# Altium footprint library TQFP.PcbLib: 17 footprints (part 1 of 2)
Each footprint in its own frame and in the unit in brackets; x right, y up, seen from the top. Pads: shape width x height; smd on the part's side, far side on the other; paste and mask are expansions set on the pad; w line width, h text height; cw(c..) or ccw(c..) is an arc to the next point about the centre after c.
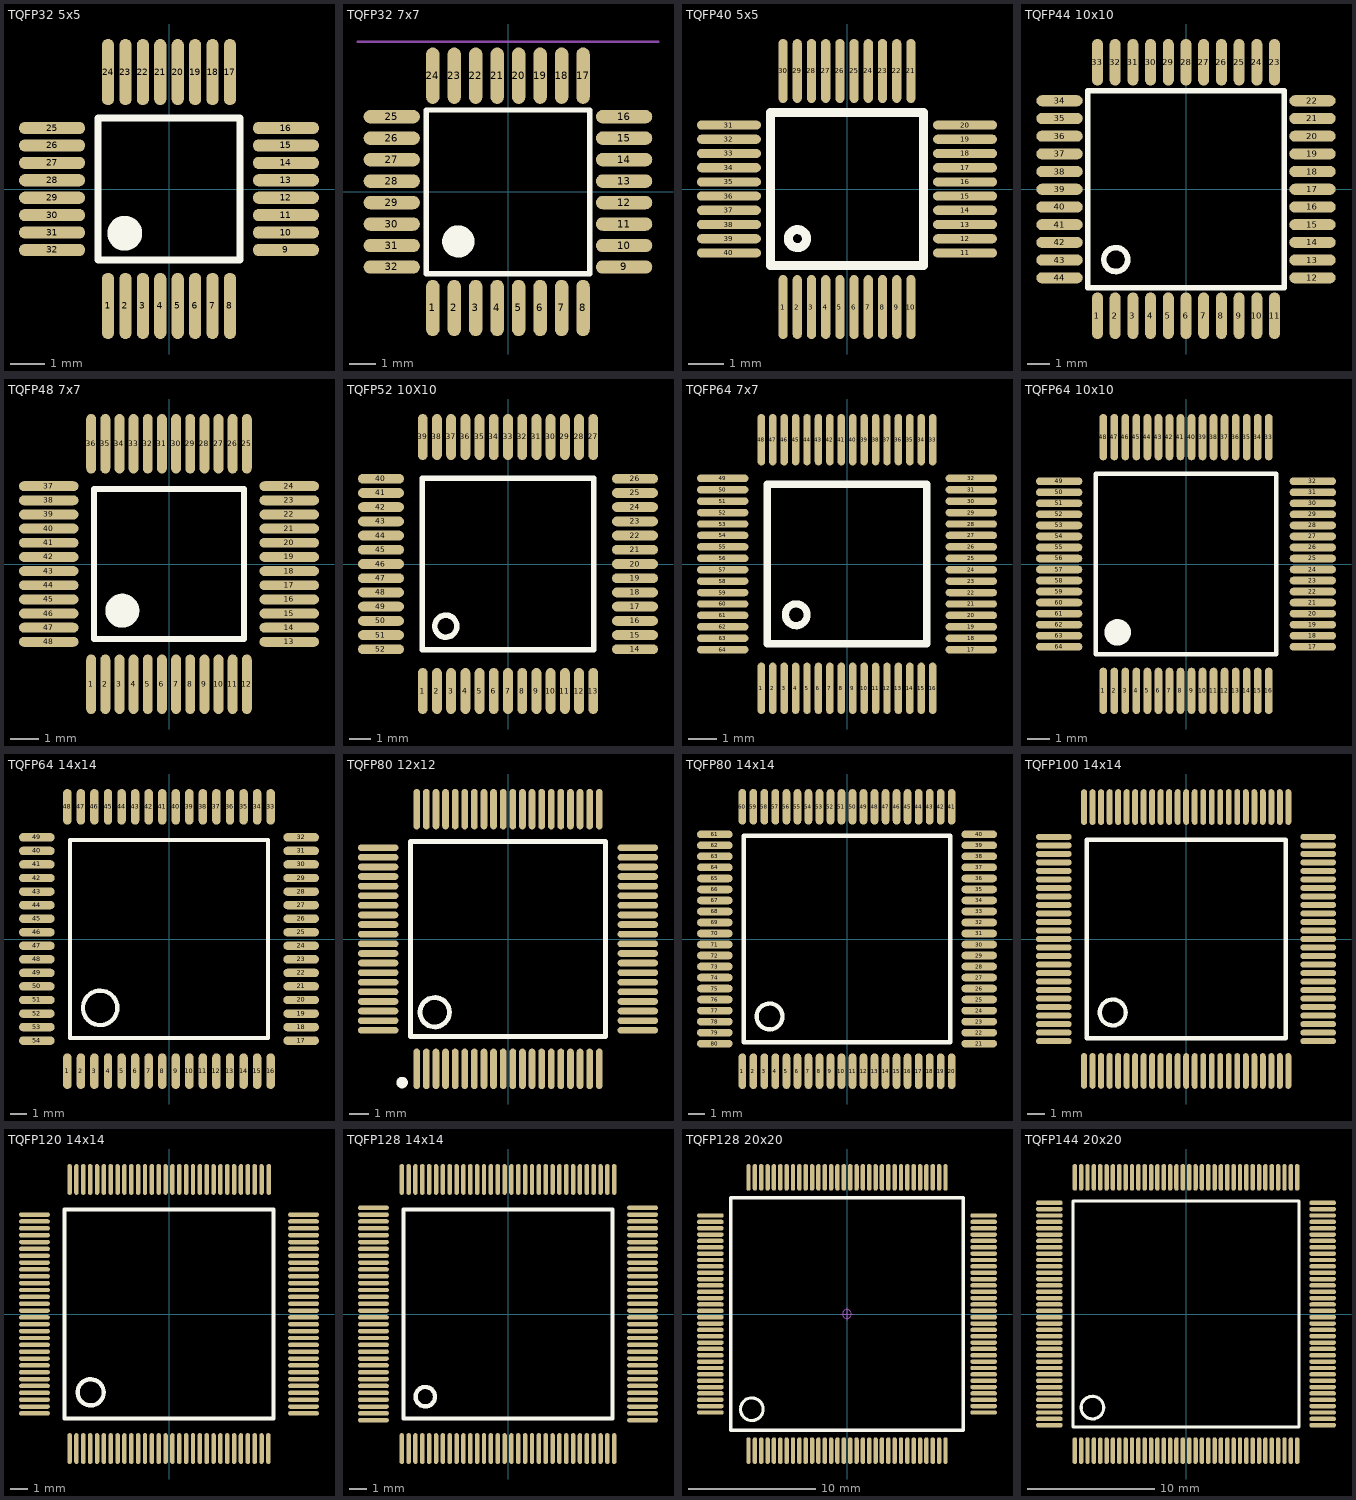
[diagram p0: the footprints below, top view; thin cyan lines are the x and y axes]

## TQFP32 5x5 [mm]
pads (32):
  oval 0.35x1.9 smd: 1(-1.75,-3.356) 2(-1.25,-3.356) 3(-0.75,-3.356) 4(-0.25,-3.356) 5(0.25,-3.356) 6(0.75,-3.356) 7(1.25,-3.356) 8(1.75,-3.356) 17(1.75,3.356) 18(1.25,3.356) 19(0.75,3.356) 20(0.25,3.356) 21(-0.25,3.356) 22(-0.75,3.356) 23(-1.25,3.356) 24(-1.75,3.356)
  oval 1.9x0.35 smd: 9(3.356,-1.75) 10(3.356,-1.25) 11(3.356,-0.75) 12(3.356,-0.25) 13(3.356,0.25) 14(3.356,0.75) 15(3.356,1.25) 16(3.356,1.75) 25(-3.356,1.75) 26(-3.356,1.25) 27(-3.356,0.75) 28(-3.356,0.25) 29(-3.356,-0.25) 30(-3.356,-0.75) 31(-3.356,-1.25) 32(-3.356,-1.75)
Top Overlay:
  circle w0.6: c-1.27,-1.27 r0.2
  lines w0.2: -2.032,-2.032 -2.032,2.032 2.032,2.032 2.032,-2.032 -2.032,-2.032
3D body "TQFP32 5x5.STEP": height 1.05, standoff 0, extent -3.525,-3.502 3.48,3.502

## TQFP32 7x7 [mm]
pads (32):
  oval 0.5x2.1 smd: 1(-2.803,-4.327) 2(-2.003,-4.327) 3(-1.203,-4.327) 4(-0.403,-4.327) 5(0.397,-4.327) 6(1.197,-4.327) 7(1.997,-4.327) 8(2.797,-4.327) 17(2.797,4.327) 18(1.997,4.327) 19(1.197,4.327) 20(0.397,4.327) 21(-0.403,4.327) 22(-1.203,4.327) 23(-2.003,4.327) 24(-2.803,4.327)
  oval 2.1x0.5 smd: 9(4.324,-2.8) 10(4.324,-2) 11(4.324,-1.2) 12(4.324,-0.4) 13(4.324,0.4) 14(4.324,1.2) 15(4.324,2) 16(4.324,2.8) 25(-4.33,2.8) 26(-4.33,2) 27(-4.33,1.2) 28(-4.33,0.4) 29(-4.33,-0.4) 30(-4.33,-1.2) 31(-4.33,-2) 32(-4.33,-2.8)
Top Overlay:
  circle w0.6: c-1.853,-1.85 r0.3
  lines w0.2: -3.048,-3.048 3.048,-3.048 3.048,3.048 -3.048,3.048 -3.048,-3.048
Mechanical 15:
  lines w0.1: -5.588,5.588 5.588,5.588
3D body "TQFP32 7x7.STEP": height 1.05, standoff 0, extent -4.502,-4.483 4.502,4.521

## TQFP40 5x5 [mm]
pads (40):
  oval 0.26x1.8 smd: 1(-1.8,-3.324) 2(-1.4,-3.324) 3(-1,-3.324) 4(-0.6,-3.324) 5(-0.2,-3.324) 6(0.2,-3.324) 7(0.6,-3.324) 8(1,-3.324) 9(1.4,-3.324) 10(1.8,-3.324) 21(1.8,3.324) 22(1.4,3.324) 23(1,3.324) 24(0.6,3.324) 25(0.2,3.324) 26(-0.2,3.324) 27(-0.6,3.324) 28(-1,3.324) 29(-1.4,3.324) 30(-1.8,3.324)
  oval 1.8x0.26 smd: 11(3.324,-1.8) 12(3.324,-1.4) 13(3.324,-1) 14(3.324,-0.6) 15(3.324,-0.2) 16(3.324,0.2) 17(3.324,0.6) 18(3.324,1) 19(3.324,1.4) 20(3.324,1.8) 31(-3.324,1.8) 32(-3.324,1.4) 33(-3.324,1) 34(-3.324,0.6) 35(-3.324,0.2) 36(-3.324,-0.2) 37(-3.324,-0.6) 38(-3.324,-1) 39(-3.324,-1.4) 40(-3.324,-1.8)
Top Overlay:
  circle w0.254: c-1.397,-1.397 r0.254
  lines w0.254: -2.159,-2.159 -2.159,2.159 2.159,2.159 2.159,-2.159 -2.159,-2.159
3D body "TQFP40 5x5.STEP": height 1.05, standoff 0, extent -3.502,-3.499 3.502,3.505

## TQFP44 10x10 [mm]
pads (44):
  oval 0.5x2.1 smd: 1(-4,-5.715) 2(-3.2,-5.715) 3(-2.4,-5.715) 4(-1.6,-5.715) 5(-0.8,-5.715) 6(0,-5.715) 7(0.8,-5.715) 8(1.6,-5.715) 9(2.4,-5.715) 10(3.2,-5.715) 11(4,-5.715) 23(4,5.74) 24(3.2,5.74) 25(2.4,5.74) 26(1.6,5.74) 27(0.8,5.74) 28(0,5.74) 29(-0.8,5.74) 30(-1.6,5.74) 31(-2.4,5.74) 32(-3.2,5.74) 33(-4,5.74)
  oval 2.1x0.5 smd: 12(5.715,-4) 13(5.715,-3.2) 14(5.715,-2.4) 15(5.715,-1.6) 16(5.715,-0.8) 17(5.715,0) 18(5.715,0.8) 19(5.715,1.6) 20(5.715,2.4) 21(5.715,3.2) 22(5.715,4) 34(-5.715,4) 35(-5.715,3.2) 36(-5.715,2.4) 37(-5.715,1.6) 38(-5.715,0.8) 39(-5.715,0) 40(-5.715,-0.8) 41(-5.715,-1.6) 42(-5.715,-2.4) 43(-5.715,-3.2) 44(-5.715,-4)
Top Overlay:
  circle w0.254: c-3.175,-3.175 r0.539
  lines w0.254: -4.445,-4.445 4.445,-4.445 4.445,4.445 -4.445,4.445 -4.445,-4.445
3D body "TQFP44 10x10.STEP": height 1.05, standoff 0, extent -6.002,-5.984 6.002,6.02

## TQFP48 7x7 [mm]
pads (48):
  oval 0.35x2.1 smd: 1(-2.75,-4.251) 2(-2.25,-4.251) 3(-1.75,-4.251) 4(-1.25,-4.251) 5(-0.75,-4.251) 6(-0.25,-4.251) 7(0.25,-4.251) 8(0.75,-4.251) 9(1.25,-4.251) 10(1.75,-4.251) 11(2.25,-4.251) 12(2.75,-4.251) 25(2.75,4.251) 26(2.25,4.251) 27(1.75,4.251) 28(1.25,4.251) 29(0.75,4.251) 30(0.25,4.251) 31(-0.25,4.251) 32(-0.75,4.251) 33(-1.25,4.251) 34(-1.75,4.251) 35(-2.25,4.251) 36(-2.75,4.251)
  oval 2.1x0.35 smd: 13(4.251,-2.75) 14(4.251,-2.25) 15(4.251,-1.75) 16(4.251,-1.25) 17(4.251,-0.75) 18(4.251,-0.25) 19(4.251,0.25) 20(4.251,0.75) 21(4.251,1.25) 22(4.251,1.75) 23(4.251,2.25) 24(4.251,2.75) 37(-4.251,2.75) 38(-4.251,2.25) 39(-4.251,1.75) 40(-4.251,1.25) 41(-4.251,0.75) 42(-4.251,0.25) 43(-4.251,-0.25) 44(-4.251,-0.75) 45(-4.251,-1.25) 46(-4.251,-1.75) 47(-4.251,-2.25) 48(-4.251,-2.75)
Top Overlay:
  circle w0.6: c-1.65,-1.65 r0.3
  lines w0.2: -2.65,-2.65 2.65,-2.65 2.65,2.65 -2.65,2.65 -2.65,-2.65
3D body "TQFP48 7x7.STEP": height 1.05, standoff 0, extent -4.502,-4.508 4.502,4.496

## TQFP52 10X10 [mm]
pads (52):
  oval 0.45x2.1 smd: 1(-3.9,-5.81) 2(-3.25,-5.81) 3(-2.6,-5.81) 4(-1.95,-5.81) 5(-1.3,-5.81) 6(-0.65,-5.81) 7(0,-5.81) 8(0.65,-5.81) 9(1.3,-5.81) 10(1.95,-5.81) 11(2.6,-5.81) 12(3.25,-5.81) 13(3.9,-5.81) 27(3.9,5.81) 28(3.25,5.81) 29(2.6,5.81) 30(1.95,5.81) 31(1.3,5.81) 32(0.65,5.81) 33(0,5.81) 34(-0.65,5.81) 35(-1.3,5.81) 36(-1.95,5.81) 37(-2.6,5.81) 38(-3.25,5.81) 39(-3.9,5.81)
  oval 2.1x0.45 smd: 14(5.81,-3.9) 15(5.81,-3.25) 16(5.81,-2.6) 17(5.81,-1.95) 18(5.81,-1.3) 19(5.81,-0.65) 20(5.81,0) 21(5.81,0.65) 22(5.81,1.3) 23(5.81,1.95) 24(5.81,2.6) 25(5.81,3.25) 26(5.81,3.9) 40(-5.81,3.9) 41(-5.81,3.25) 42(-5.81,2.6) 43(-5.81,1.95) 44(-5.81,1.3) 45(-5.81,0.65) 46(-5.81,0) 47(-5.81,-0.65) 48(-5.81,-1.3) 49(-5.81,-1.95) 50(-5.81,-2.6) 51(-5.81,-3.25) 52(-5.81,-3.9)
Top Overlay:
  circle w0.254: c-2.845,-2.845 r0.503
  lines w0.254: -3.912,-3.912 3.912,-3.912 3.912,3.912 -3.912,3.912 -3.912,-3.912
3D body "TQFP52 10X10.STEP": height 1.05, standoff 0, extent -6.002,-6.01 6.002,5.994

## TQFP64 7x7 [mm]
pads (64):
  oval 0.26x1.8 smd: 1(-3,-4.352) 2(-2.6,-4.352) 3(-2.2,-4.352) 4(-1.8,-4.352) 5(-1.4,-4.352) 6(-1,-4.352) 7(-0.6,-4.352) 8(-0.2,-4.352) 9(0.2,-4.352) 10(0.6,-4.352) 11(1,-4.352) 12(1.4,-4.352) 13(1.8,-4.352) 14(2.2,-4.352) 15(2.6,-4.352) 16(3,-4.352) 33(3,4.352) 34(2.6,4.352) 35(2.2,4.352) 36(1.8,4.352) 37(1.4,4.352) 38(1,4.352) 39(0.6,4.352) 40(0.2,4.352) 41(-0.2,4.352) 42(-0.6,4.352) 43(-1,4.352) 44(-1.4,4.352) 45(-1.8,4.352) 46(-2.2,4.352) 47(-2.6,4.352) 48(-3,4.352)
  oval 1.8x0.26 smd: 17(4.352,-3) 18(4.352,-2.6) 19(4.352,-2.2) 20(4.352,-1.8) 21(4.352,-1.4) 22(4.352,-1) 23(4.352,-0.6) 24(4.352,-0.2) 25(4.352,0.2) 26(4.352,0.6) 27(4.352,1) 28(4.352,1.4) 29(4.352,1.8) 30(4.352,2.2) 31(4.352,2.6) 32(4.352,3) 49(-4.352,3) 50(-4.352,2.6) 51(-4.352,2.2) 52(-4.352,1.8) 53(-4.352,1.4) 54(-4.352,1) 55(-4.352,0.6) 56(-4.352,0.2) 57(-4.352,-0.2) 58(-4.352,-0.6) 59(-4.352,-1) 60(-4.352,-1.4) 61(-4.352,-1.8) 62(-4.352,-2.2) 63(-4.352,-2.6) 64(-4.352,-3)
Top Overlay:
  circle w0.254: c-1.778,-1.778 r0.381
  lines w0.254: -2.794,-2.794 -2.794,2.794 2.794,2.794 2.794,-2.794 -2.794,-2.794
3D body "TQFP64 7x7.STEP": height 1.05, standoff 0, extent -4.502,-4.508 4.502,4.496

## TQFP64 10x10 [mm]
pads (64):
  oval 0.35x2.1 smd: 1(-3.75,-5.752) 2(-3.25,-5.752) 3(-2.75,-5.752) 4(-2.25,-5.752) 5(-1.75,-5.752) 6(-1.25,-5.752) 7(-0.75,-5.752) 8(-0.25,-5.752) 9(0.25,-5.752) 10(0.75,-5.752) 11(1.25,-5.752) 12(1.75,-5.752) 13(2.25,-5.752) 14(2.75,-5.752) 15(3.25,-5.752) 16(3.75,-5.752) 33(3.75,5.752) 34(3.25,5.752) 35(2.75,5.752) 36(2.25,5.752) 37(1.75,5.752) 38(1.25,5.752) 39(0.75,5.752) 40(0.25,5.752) 41(-0.25,5.752) 42(-0.75,5.752) 43(-1.25,5.752) 44(-1.75,5.752) 45(-2.25,5.752) 46(-2.75,5.752) 47(-3.25,5.752) 48(-3.75,5.752)
  oval 2.1x0.35 smd: 17(5.752,-3.75) 18(5.752,-3.25) 19(5.752,-2.75) 20(5.752,-2.25) 21(5.752,-1.75) 22(5.752,-1.25) 23(5.752,-0.75) 24(5.752,-0.25) 25(5.752,0.25) 26(5.752,0.75) 27(5.752,1.25) 28(5.752,1.75) 29(5.752,2.25) 30(5.752,2.75) 31(5.752,3.25) 32(5.752,3.75) 49(-5.752,3.75) 50(-5.752,3.25) 51(-5.752,2.75) 52(-5.752,2.25) 53(-5.752,1.75) 54(-5.752,1.25) 55(-5.752,0.75) 56(-5.752,0.25) 57(-5.752,-0.25) 58(-5.752,-0.75) 59(-5.752,-1.25) 60(-5.752,-1.75) 61(-5.752,-2.25) 62(-5.752,-2.75) 63(-5.752,-3.25) 64(-5.752,-3.75)
Top Overlay:
  circle w0.6: c-3.1,-3.1 r0.3
  lines w0.2: -4.1,-4.1 4.1,-4.1 4.1,4.1 -4.1,4.1 -4.1,-4.1
3D body "TQFP64 10x10.STEP": height 1.05, standoff 0, extent -6.002,-5.984 6.002,6.02

## TQFP64 14x14 [mm]
pads (64):
  oval 0.5x2.1 smd: 1(-6,-7.803) 2(-5.2,-7.803) 3(-4.4,-7.803) 4(-3.6,-7.803) 5(-2.8,-7.803) 6(-2,-7.803) 7(-1.2,-7.803) 8(-0.4,-7.803) 9(0.4,-7.803) 10(1.2,-7.803) 11(2,-7.803) 12(2.8,-7.803) 13(3.6,-7.803) 14(4.4,-7.803) 15(5.2,-7.803) 16(6,-7.803) 33(6,7.803) 34(5.2,7.803) 35(4.4,7.803) 36(3.6,7.803) 37(2.8,7.803) 38(2,7.803) 39(1.2,7.803) 40(0.4,7.803) 41(-0.4,7.803) 42(-1.2,7.803) 43(-2,7.803) 44(-2.8,7.803) 45(-3.6,7.803) 46(-4.4,7.803) 47(-5.2,7.803) 48(-6,7.803)
  oval 2.1x0.5 smd: 17(7.803,-6) 18(7.803,-5.2) 19(7.803,-4.4) 20(7.803,-3.6) 21(7.803,-2.8) 22(7.803,-2) 23(7.803,-1.2) 24(7.803,-0.4) 25(7.803,0.4) 26(7.803,1.2) 27(7.803,2) 28(7.803,2.8) 29(7.803,3.6) 30(7.803,4.4) 31(7.803,5.2) 32(7.803,6) 40(-7.803,5.2) 41(-7.803,4.4) 42(-7.803,3.6) 43(-7.803,2.8) 44(-7.803,2) 45(-7.803,1.2) 46(-7.803,0.4) 47(-7.803,-0.4) 48(-7.803,-1.2) 49(-7.803,-2) 49(-7.803,6) 50(-7.803,-2.8) 51(-7.803,-3.6) 52(-7.803,-4.4) 53(-7.803,-5.2) 54(-7.803,-6)
Top Overlay:
  circle w0.254: c-4.064,-4.064 r1.016
  lines w0.254: -5.842,-5.842 5.842,-5.842 5.842,5.842 -5.842,5.842 -5.842,-5.842
3D body "TQFP64 14x14.STEP": height 1.05, standoff 0, extent -7.976,-8.002 8.029,8.002

## TQFP80 12x12 [mm]
pads (80):
  oval 0.35x2.1 smd: 1(-4.752,-6.754) 2(-4.252,-6.754) 3(-3.752,-6.754) 4(-3.252,-6.754) 5(-2.752,-6.754) 6(-2.252,-6.754) 7(-1.752,-6.754) 8(-1.252,-6.754) 9(-0.752,-6.754) 10(-0.252,-6.754) 11(0.248,-6.754) 12(0.748,-6.754) 13(1.248,-6.754) 14(1.748,-6.754) 15(2.248,-6.754) 16(2.748,-6.754) 17(3.248,-6.754) 18(3.748,-6.754) 19(4.248,-6.754) 20(4.748,-6.754) 41(4.748,6.754) 42(4.248,6.754) 43(3.748,6.754) 44(3.248,6.754) 45(2.748,6.754) 46(2.248,6.754) 47(1.748,6.754) 48(1.248,6.754) 49(0.748,6.754) 50(0.248,6.754) 51(-0.252,6.754) 52(-0.752,6.754) 53(-1.252,6.754) 54(-1.752,6.754) 55(-2.252,6.754) 56(-2.752,6.754) 57(-3.252,6.754) 58(-3.752,6.754) 59(-4.252,6.754) 60(-4.752,6.754)
  oval 2.1x0.35 smd: 21(6.752,-4.75) 22(6.752,-4.25) 23(6.752,-3.75) 24(6.752,-3.25) 25(6.752,-2.75) 26(6.752,-2.25) 27(6.752,-1.75) 28(6.752,-1.25) 29(6.752,-0.75) 30(6.752,-0.25) 31(6.752,0.25) 32(6.752,0.75) 33(6.752,1.25) 34(6.752,1.75) 35(6.752,2.25) 36(6.752,2.75) 37(6.752,3.25) 38(6.752,3.75) 39(6.752,4.25) 40(6.752,4.75) 61(-6.756,4.75) 62(-6.756,4.25) 63(-6.756,3.75) 64(-6.756,3.25) 65(-6.756,2.75) 66(-6.756,2.25) 67(-6.756,1.75) 68(-6.756,1.25) 69(-6.756,0.75) 70(-6.756,0.25) 71(-6.756,-0.25) 72(-6.756,-0.75) 73(-6.756,-1.25) 74(-6.756,-1.75) 75(-6.756,-2.25) 76(-6.756,-2.75) 77(-6.756,-3.25) 78(-6.756,-3.75) 79(-6.756,-4.25) 80(-6.756,-4.75)
Top Overlay:
  circle w0.35: c-5.512,-7.468 r0.125
  circle w0.254: c-3.812,-3.81 r0.762
  lines w0.254: -5.082,-5.08 5.078,-5.08 5.078,5.08 -5.082,5.08 -5.082,-5.08
3D body "TQFP80 12x12.STEP": height 1.05, standoff 0, extent -7.01,-6.994 6.994,7.01

## TQFP80 14x14 [mm]
pads (80):
  oval 0.45x2.1 smd: 1(-6.175,-7.805) 2(-5.525,-7.805) 3(-4.875,-7.805) 4(-4.225,-7.805) 5(-3.575,-7.805) 6(-2.925,-7.805) 7(-2.275,-7.805) 8(-1.625,-7.805) 9(-0.975,-7.805) 10(-0.325,-7.805) 11(0.325,-7.805) 12(0.975,-7.805) 13(1.625,-7.805) 14(2.275,-7.805) 15(2.925,-7.805) 16(3.575,-7.805) 17(4.225,-7.805) 18(4.875,-7.805) 19(5.525,-7.805) 20(6.175,-7.805) 41(6.175,7.805) 42(5.525,7.805) 43(4.875,7.805) 44(4.225,7.805) 45(3.575,7.805) 46(2.925,7.805) 47(2.275,7.805) 48(1.625,7.805) 49(0.975,7.805) 50(0.325,7.805) 51(-0.325,7.805) 52(-0.975,7.805) 53(-1.625,7.805) 54(-2.275,7.805) 55(-2.925,7.805) 56(-3.575,7.805) 57(-4.225,7.805) 58(-4.875,7.805) 59(-5.525,7.805) 60(-6.175,7.805)
  oval 2.1x0.45 smd: 21(7.805,-6.175) 22(7.805,-5.525) 23(7.805,-4.875) 24(7.805,-4.225) 25(7.805,-3.575) 26(7.805,-2.925) 27(7.805,-2.275) 28(7.805,-1.625) 29(7.805,-0.975) 30(7.805,-0.325) 31(7.805,0.325) 32(7.805,0.975) 33(7.805,1.625) 34(7.805,2.275) 35(7.805,2.925) 36(7.805,3.575) 37(7.805,4.225) 38(7.805,4.875) 39(7.805,5.525) 40(7.805,6.175) 61(-7.805,6.175) 62(-7.805,5.525) 63(-7.805,4.875) 64(-7.805,4.225) 65(-7.805,3.575) 66(-7.805,2.925) 67(-7.805,2.275) 68(-7.805,1.625) 69(-7.805,0.975) 70(-7.805,0.325) 71(-7.805,-0.325) 72(-7.805,-0.975) 73(-7.805,-1.625) 74(-7.805,-2.275) 75(-7.805,-2.925) 76(-7.805,-3.575) 77(-7.805,-4.225) 78(-7.805,-4.875) 79(-7.805,-5.525) 80(-7.805,-6.175)
Top Overlay:
  circle w0.254: c-4.572,-4.575 r0.762
  lines w0.254: -6.096,-6.099 6.096,-6.099 6.096,6.093 -6.096,6.093 -6.096,-6.099
3D body "TQFP80 14x14.STEP": height 1.05, standoff 0, extent -8.002,-8.029 8.002,7.976

## TQFP100 14x14 [mm]
pads (100):
  oval 0.35x2.1 smd: 1(-6,-7.752) 2(-5.5,-7.752) 3(-5,-7.752) 4(-4.5,-7.752) 5(-4,-7.752) 6(-3.5,-7.752) 7(-3,-7.752) 8(-2.5,-7.752) 9(-2,-7.752) 10(-1.5,-7.752) 11(-1,-7.752) 12(-0.5,-7.752) 13(0,-7.752) 14(0.5,-7.752) 15(1,-7.752) 16(1.5,-7.752) 17(2,-7.752) 18(2.5,-7.752) 19(3,-7.752) 20(3.5,-7.752) 21(4,-7.752) 22(4.5,-7.752) 23(5,-7.752) 24(5.5,-7.752) 25(6,-7.752) 51(6,7.752) 52(5.5,7.752) 53(5,7.752) 54(4.5,7.752) 55(4,7.752) 56(3.5,7.752) 57(3,7.752) 58(2.5,7.752) 59(2,7.752) 60(1.5,7.752) 61(1,7.752) 62(0.5,7.752) 63(0,7.752) 64(-0.5,7.752) 65(-1,7.752) 66(-1.5,7.752) 67(-2,7.752) 68(-2.5,7.752) 69(-3,7.752) 70(-3.5,7.752) 71(-4,7.752) 72(-4.5,7.752) 73(-5,7.752) 74(-5.5,7.752) 75(-6,7.752)
  oval 2.1x0.35 smd: 26(7.752,-6) 27(7.752,-5.5) 28(7.752,-5) 29(7.752,-4.5) 30(7.752,-4) 31(7.752,-3.5) 32(7.752,-3) 33(7.752,-2.5) 34(7.752,-2) 35(7.752,-1.5) 36(7.752,-1) 37(7.752,-0.5) 38(7.752,0) 39(7.752,0.5) 40(7.752,1) 41(7.752,1.5) 42(7.752,2) 43(7.752,2.5) 44(7.752,3) 45(7.752,3.5) 46(7.752,4) 47(7.752,4.5) 48(7.752,5) 49(7.752,5.5) 50(7.752,6) 76(-7.778,6) 77(-7.778,5.5) 78(-7.778,5) 79(-7.778,4.5) 80(-7.778,4) 81(-7.778,3.5) 82(-7.778,3) 83(-7.778,2.5) 84(-7.778,2) 85(-7.778,1.5) 86(-7.778,1) 87(-7.778,0.5) 88(-7.778,0) 89(-7.778,-0.5) 90(-7.778,-1) 91(-7.778,-1.5) 92(-7.778,-2) 93(-7.778,-2.5) 94(-7.778,-3) 95(-7.778,-3.5) 96(-7.778,-4) 97(-7.778,-4.5) 98(-7.778,-5) 99(-7.778,-5.5) 100(-7.778,-6)
Top Overlay:
  circle w0.254: c-4.318,-4.318 r0.762
  lines w0.254: -5.842,-5.842 5.842,-5.842 5.842,5.842 -5.842,5.842 -5.842,-5.842
3D body "TQFP100 14x14.STEP": height 1.05, standoff 0, extent -8.026,-7.978 7.978,8.026

## TQFP120 14x14 [mm]
pads (120):
  oval 0.26x1.8 smd: 1(-5.8,-7.854) 2(-5.4,-7.854) 3(-5,-7.854) 4(-4.6,-7.854) 5(-4.2,-7.854) 6(-3.8,-7.854) 7(-3.4,-7.854) 8(-3,-7.854) 9(-2.6,-7.854) 10(-2.2,-7.854) 11(-1.8,-7.854) 12(-1.4,-7.854) 13(-1,-7.854) 14(-0.6,-7.854) 15(-0.2,-7.854) 16(0.2,-7.854) 17(0.6,-7.854) 18(1,-7.854) 19(1.4,-7.854) 20(1.8,-7.854) 21(2.2,-7.854) 22(2.6,-7.854) 23(3,-7.854) 24(3.4,-7.854) 25(3.8,-7.854) 26(4.2,-7.854) 27(4.6,-7.854) 28(5,-7.854) 29(5.4,-7.854) 30(5.8,-7.854) 61(5.825,7.854) 62(5.4,7.854) 63(5,7.854) 64(4.6,7.854) 65(4.2,7.854) 66(3.8,7.854) 67(3.4,7.854) 68(3,7.854) 69(2.6,7.854) 70(2.2,7.854) 71(1.8,7.854) 72(1.4,7.854) 73(1,7.854) 74(0.6,7.854) 75(0.2,7.854) 76(-0.2,7.854) 77(-0.6,7.854) 78(-1,7.854) 79(-1.4,7.854) 80(-1.8,7.854) 81(-2.2,7.854) 82(-2.6,7.854) 83(-3,7.854) 84(-3.4,7.854) 85(-3.8,7.854) 86(-4.2,7.854) 87(-4.6,7.854) 88(-5,7.854) 89(-5.4,7.854) 90(-5.8,7.854)
  oval 1.8x0.26 smd: 31(7.854,-5.8) 32(7.854,-5.4) 33(7.854,-5) 34(7.854,-4.6) 35(7.854,-4.2) 36(7.854,-3.8) 37(7.854,-3.4) 38(7.854,-3) 39(7.854,-2.6) 40(7.854,-2.2) 41(7.854,-1.8) 42(7.854,-1.4) 43(7.854,-1) 44(7.854,-0.6) 45(7.854,-0.2) 46(7.854,0.2) 47(7.854,0.6) 48(7.854,1) 49(7.854,1.4) 50(7.854,1.8) 51(7.854,2.2) 52(7.854,2.6) 53(7.854,3) 54(7.854,3.4) 55(7.854,3.8) 56(7.854,4.2) 57(7.854,4.6) 58(7.854,5) 59(7.854,5.4) 60(7.854,5.8) 91(-7.854,5.8) 92(-7.854,5.4) 93(-7.854,5) 94(-7.854,4.6) 95(-7.854,4.2) 96(-7.854,3.8) 97(-7.854,3.4) 98(-7.854,3) 99(-7.854,2.6) 100(-7.854,2.2) 101(-7.854,1.8) 102(-7.854,1.4) 103(-7.854,1) 104(-7.854,0.6) 105(-7.854,0.2) 106(-7.854,-0.2) 107(-7.854,-0.6) 108(-7.854,-1) 109(-7.854,-1.4) 110(-7.854,-1.8) 111(-7.854,-2.2) 112(-7.854,-2.6) 113(-7.854,-3) 114(-7.854,-3.4) 115(-7.854,-3.8) 116(-7.854,-4.2) 117(-7.854,-4.6) 118(-7.854,-5) 119(-7.854,-5.4) 120(-7.854,-5.8)
Top Overlay:
  circle w0.254: c-4.572,-4.572 r0.762
  lines w0.254: -6.096,-6.096 -6.096,6.096 6.096,6.096 6.096,-6.096 -6.096,-6.096
3D body "TQFP120 14x14.STEP": height 1.05, standoff 0, extent -8.002,-8.003 8.002,8.001

## TQFP128 14x14 [mm]
pads (128):
  oval 0.26x1.8 smd: 1(-6.2,-7.854) 2(-5.8,-7.854) 3(-5.4,-7.854) 4(-5,-7.854) 5(-4.6,-7.854) 6(-4.2,-7.854) 7(-3.8,-7.854) 8(-3.4,-7.854) 9(-3,-7.854) 10(-2.6,-7.854) 11(-2.2,-7.854) 12(-1.8,-7.854) 13(-1.4,-7.854) 14(-1,-7.854) 15(-0.6,-7.854) 16(-0.2,-7.854) 17(0.2,-7.854) 18(0.6,-7.854) 19(1,-7.854) 20(1.4,-7.854) 21(1.8,-7.854) 22(2.2,-7.854) 23(2.6,-7.854) 24(3,-7.854) 25(3.4,-7.854) 26(3.8,-7.854) 27(4.2,-7.854) 28(4.6,-7.854) 29(5,-7.854) 30(5.4,-7.854) 31(5.8,-7.854) 32(6.2,-7.854) 65(6.2,7.854) 66(5.8,7.854) 67(5.4,7.854) 68(5,7.854) 69(4.6,7.854) 70(4.2,7.854) 71(3.8,7.854) 72(3.4,7.854) 73(3,7.854) 74(2.6,7.854) 75(2.2,7.854) 76(1.8,7.854) 77(1.4,7.854) 78(1,7.854) 79(0.6,7.854) 80(0.2,7.854) 81(-0.2,7.854) 82(-0.6,7.854) 83(-1,7.854) 84(-1.4,7.854) 85(-1.8,7.854) 86(-2.2,7.854) 87(-2.6,7.854) 88(-3,7.854) 89(-3.4,7.854) 90(-3.8,7.854) 91(-4.2,7.854) 92(-4.6,7.854) 93(-5,7.854) 94(-5.4,7.854) 95(-5.8,7.854) 96(-6.2,7.854)
  oval 1.8x0.26 smd: 33(7.854,-6.2) 34(7.854,-5.8) 35(7.854,-5.4) 36(7.854,-5) 37(7.854,-4.6) 38(7.854,-4.2) 39(7.854,-3.8) 40(7.854,-3.4) 41(7.854,-3) 42(7.854,-2.6) 43(7.854,-2.2) 44(7.854,-1.8) 45(7.854,-1.4) 46(7.854,-1) 47(7.854,-0.6) 48(7.854,-0.2) 49(7.854,0.2) 50(7.854,0.6) 51(7.854,1) 52(7.854,1.4) 53(7.854,1.8) 54(7.854,2.2) 55(7.854,2.6) 56(7.854,3) 57(7.854,3.4) 58(7.854,3.8) 59(7.854,4.2) 60(7.854,4.6) 61(7.854,5) 62(7.854,5.4) 63(7.854,5.8) 64(7.854,6.2) 97(-7.854,6.2) 98(-7.854,5.8) 99(-7.854,5.4) 100(-7.854,5) 101(-7.854,4.6) 102(-7.854,4.2) 103(-7.854,3.8) 104(-7.854,3.4) 105(-7.854,3) 106(-7.854,2.6) 107(-7.854,2.2) 108(-7.854,1.8) 109(-7.854,1.4) 110(-7.854,1) 111(-7.854,0.6) 112(-7.854,0.2) 113(-7.854,-0.2) 114(-7.854,-0.6) 115(-7.854,-1) 116(-7.854,-1.4) 117(-7.854,-1.8) 118(-7.854,-2.2) 119(-7.854,-2.6) 120(-7.854,-3) 121(-7.854,-3.4) 122(-7.854,-3.8) 123(-7.854,-4.2) 124(-7.854,-4.6) 125(-7.854,-5) 126(-7.854,-5.4) 127(-7.854,-5.8) 128(-7.854,-6.2)
Top Overlay:
  circle w0.254: c-4.826,-4.826 r0.568
  lines w0.254: -6.096,-6.096 -6.096,6.096 6.096,6.096 6.096,-6.096 -6.096,-6.096
3D body "TQFP128 14x14.STEP": height 1.05, standoff 0, extent -8.001,-8.003 8.003,8.001

## TQFP128 20x20 [mm]
pads (128):
  oval 0.35x2.1 smd: 1(-7.75,-10.754) 2(-7.25,-10.754) 3(-6.75,-10.754) 4(-6.25,-10.754) 5(-5.75,-10.754) 6(-5.25,-10.754) 7(-4.75,-10.754) 8(-4.25,-10.754) 9(-3.75,-10.754) 10(-3.25,-10.754) 11(-2.75,-10.754) 12(-2.25,-10.754) 13(-1.75,-10.754) 14(-1.25,-10.754) 15(-0.75,-10.754) 16(-0.25,-10.754) 17(0.25,-10.754) 18(0.75,-10.754) 19(1.25,-10.754) 20(1.75,-10.754) 21(2.25,-10.754) 22(2.75,-10.754) 23(3.25,-10.754) 24(3.75,-10.754) 25(4.25,-10.754) 26(4.75,-10.754) 27(5.25,-10.754) 28(5.75,-10.754) 29(6.25,-10.754) 30(6.75,-10.754) 31(7.25,-10.754) 32(7.75,-10.754) 65(7.75,10.754) 66(7.25,10.754) 67(6.75,10.754) 68(6.25,10.754) 69(5.75,10.754) 70(5.25,10.754) 71(4.75,10.754) 72(4.25,10.754) 73(3.75,10.754) 74(3.25,10.754) 75(2.75,10.754) 76(2.25,10.754) 77(1.75,10.754) 78(1.25,10.754) 79(0.75,10.754) 80(0.25,10.754) 81(-0.25,10.754) 82(-0.75,10.754) 83(-1.25,10.754) 84(-1.75,10.754) 85(-2.25,10.754) 86(-2.75,10.754) 87(-3.25,10.754) 88(-3.75,10.754) 89(-4.25,10.754) 90(-4.75,10.754) 91(-5.25,10.754) 92(-5.75,10.754) 93(-6.25,10.754) 94(-6.75,10.754) 95(-7.25,10.754) 96(-7.75,10.754)
  oval 2.1x0.35 smd: 33(10.754,-7.75) 34(10.754,-7.25) 35(10.754,-6.75) 36(10.754,-6.25) 37(10.754,-5.75) 38(10.754,-5.25) 39(10.754,-4.75) 40(10.754,-4.25) 41(10.754,-3.75) 42(10.754,-3.25) 43(10.754,-2.75) 44(10.754,-2.25) 45(10.754,-1.75) 46(10.754,-1.25) 47(10.754,-0.75) 48(10.754,-0.25) 49(10.754,0.25) 50(10.754,0.75) 51(10.754,1.25) 52(10.754,1.75) 53(10.754,2.25) 54(10.754,2.75) 55(10.754,3.25) 56(10.754,3.75) 57(10.754,4.25) 58(10.754,4.75) 59(10.754,5.25) 60(10.754,5.75) 61(10.754,6.25) 62(10.754,6.75) 63(10.754,7.25) 64(10.754,7.75) 97(-10.754,7.75) 98(-10.754,7.25) 99(-10.754,6.75) 100(-10.754,6.25) 101(-10.754,5.75) 102(-10.754,5.25) 103(-10.754,4.75) 104(-10.754,4.25) 105(-10.754,3.75) 106(-10.754,3.25) 107(-10.754,2.75) 108(-10.754,2.25) 109(-10.754,1.75) 110(-10.754,1.25) 111(-10.754,0.75) 112(-10.754,0.25) 113(-10.754,-0.25) 114(-10.754,-0.75) 115(-10.754,-1.25) 116(-10.754,-1.75) 117(-10.754,-2.25) 118(-10.754,-2.75) 119(-10.754,-3.25) 120(-10.754,-3.75) 121(-10.754,-4.25) 122(-10.754,-4.75) 123(-10.754,-5.25) 124(-10.754,-5.75) 125(-10.754,-6.25) 126(-10.754,-6.75) 127(-10.754,-7.25) 128(-10.754,-7.75)
Top Overlay:
  circle w0.254: c-7.493,-7.493 r0.889
  lines w0.254: -9.144,-9.144 9.144,-9.144 9.144,9.144 -9.144,9.144 -9.144,-9.144
Mechanical 15:
  circle w0.05: c0,0 r0.35
  lines w0.05: -0.5,0 0.5,0 ; 0,-0.5 0,0.5
3D body "TQFP128 20x20.STEP": height 1.05, standoff 0, extent -10.998,-11.006 11.006,10.998

## TQFP144 20x20 [mm]
pads (144):
  oval 0.35x2.1 smd: 1(-8.75,-10.754) 2(-8.25,-10.754) 3(-7.75,-10.754) 4(-7.25,-10.754) 5(-6.75,-10.754) 6(-6.25,-10.754) 7(-5.75,-10.754) 8(-5.25,-10.754) 9(-4.75,-10.754) 10(-4.25,-10.754) 11(-3.75,-10.754) 12(-3.25,-10.754) 13(-2.75,-10.754) 14(-2.25,-10.754) 15(-1.75,-10.754) 16(-1.25,-10.754) 17(-0.75,-10.754) 18(-0.25,-10.754) 19(0.25,-10.754) 20(0.75,-10.754) 21(1.25,-10.754) 22(1.75,-10.754) 23(2.25,-10.754) 24(2.75,-10.754) 25(3.25,-10.754) 26(3.75,-10.754) 27(4.25,-10.754) 28(4.75,-10.754) 29(5.25,-10.754) 30(5.75,-10.754) 31(6.25,-10.754) 32(6.75,-10.754) 33(7.25,-10.754) 34(7.75,-10.754) 35(8.25,-10.754) 36(8.75,-10.754) 73(8.75,10.754) 74(8.25,10.754) 75(7.75,10.754) 76(7.25,10.754) 77(6.75,10.754) 78(6.25,10.754) 79(5.75,10.754) 80(5.25,10.754) 81(4.75,10.754) 82(4.25,10.754) 83(3.75,10.754) 84(3.25,10.754) 85(2.75,10.754) 86(2.25,10.754) 87(1.75,10.754) 88(1.25,10.754) 89(0.75,10.754) 90(0.25,10.754) 91(-0.25,10.754) 92(-0.75,10.754) 93(-1.25,10.754) 94(-1.75,10.754) 95(-2.25,10.754) 96(-2.75,10.754) 97(-3.25,10.754) 98(-3.75,10.754) 99(-4.25,10.754) 100(-4.75,10.754) 101(-5.25,10.754) 102(-5.75,10.754) 103(-6.25,10.754) 104(-6.75,10.754) 105(-7.25,10.754) 106(-7.75,10.754) 107(-8.25,10.754) 108(-8.75,10.754)
  oval 2.1x0.35 smd: 37(10.754,-8.75) 38(10.754,-8.25) 39(10.754,-7.75) 40(10.754,-7.25) 41(10.754,-6.75) 42(10.754,-6.25) 43(10.754,-5.75) 44(10.754,-5.25) 45(10.754,-4.75) 46(10.754,-4.25) 47(10.754,-3.75) 48(10.754,-3.25) 49(10.754,-2.75) 50(10.754,-2.25) 51(10.754,-1.75) 52(10.754,-1.25) 53(10.754,-0.75) 54(10.754,-0.25) 55(10.754,0.25) 56(10.754,0.75) 57(10.754,1.25) 58(10.754,1.75) 59(10.754,2.25) 60(10.754,2.75) 61(10.754,3.25) 62(10.754,3.75) 63(10.754,4.25) 64(10.754,4.75) 65(10.754,5.25) 66(10.754,5.75) 67(10.754,6.25) 68(10.754,6.75) 69(10.754,7.25) 70(10.754,7.75) 71(10.754,8.25) 72(10.754,8.75) 109(-10.754,8.75) 110(-10.754,8.25) 111(-10.754,7.75) 112(-10.754,7.25) 113(-10.754,6.75) 114(-10.754,6.25) 115(-10.754,5.75) 116(-10.754,5.25) 117(-10.754,4.75) 118(-10.754,4.25) 119(-10.754,3.75) 120(-10.754,3.25) 121(-10.754,2.75) 122(-10.754,2.25) 123(-10.754,1.75) 124(-10.754,1.25) 125(-10.754,0.75) 126(-10.754,0.25) 127(-10.754,-0.25) 128(-10.754,-0.75) 129(-10.754,-1.25) 130(-10.754,-1.75) 131(-10.754,-2.25) 132(-10.754,-2.75) 133(-10.754,-3.25) 134(-10.754,-3.75) 135(-10.754,-4.25) 136(-10.754,-4.75) 137(-10.754,-5.25) 138(-10.754,-5.75) 139(-10.754,-6.25) 140(-10.754,-6.75) 141(-10.754,-7.25) 142(-10.754,-7.75) 143(-10.754,-8.25) 144(-10.754,-8.75)
Top Overlay:
  circle w0.254: c-7.366,-7.366 r0.889
  lines w0.254: -8.89,-8.89 8.89,-8.89 8.89,8.89 -8.89,8.89 -8.89,-8.89
3D body "TQFP144 20x20.STEP": height 1.05, standoff 0, extent -10.998,-10.981 11.006,11.024